# Altium footprint library Module-RaspberryPi.PcbLib: 10 footprints
Each footprint in its own frame and in the unit in brackets; x right, y up, seen from the top. Pads: shape width x height; smd on the part's side, far side on the other; paste and mask are expansions set on the pad; w line width, h text height; cw(c..) or ccw(c..) is an arc to the next point about the centre after c.
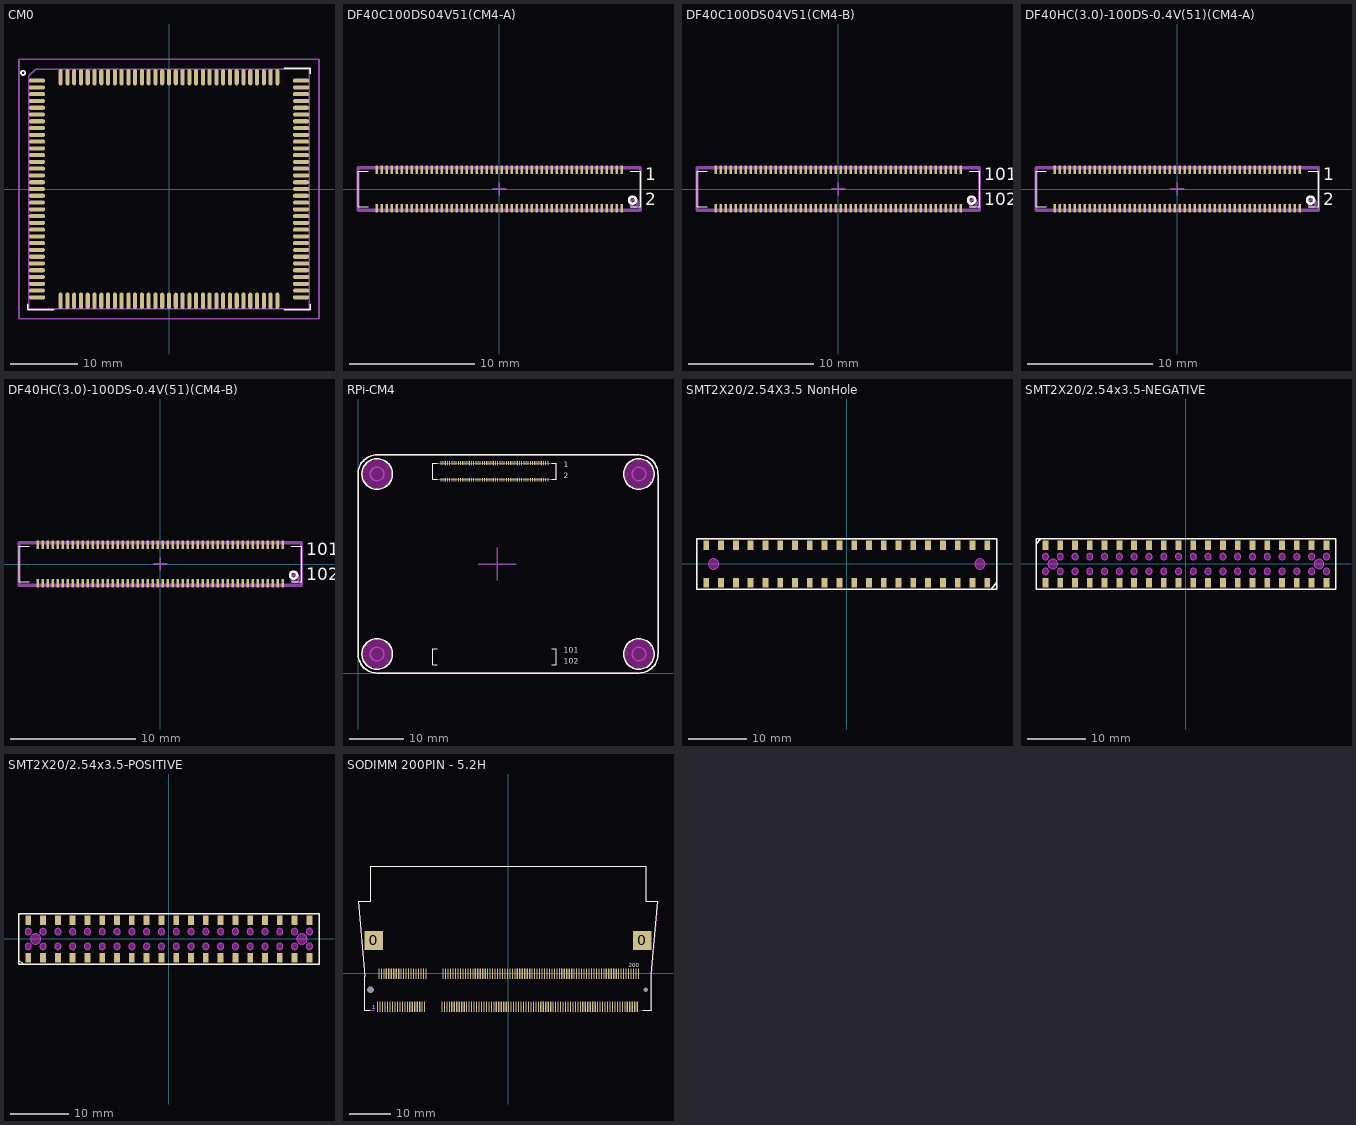
[diagram p0: the footprints below, top view; thin cyan lines are the x and y axes]

## CM0 [mm]
pads (132):
  oval 2.4x0.6 smd: 1(-19.5,16) 2(-19.5,15) 3(-19.5,14) 4(-19.5,13) 5(-19.5,12) 6(-19.5,11) 7(-19.5,10) 8(-19.5,9) 9(-19.5,8) 10(-19.5,7) 11(-19.5,6) 12(-19.5,5) 13(-19.5,4) 14(-19.5,3) 15(-19.5,2) 16(-19.5,1) 17(-19.5,0) 18(-19.5,-1) 19(-19.5,-2) 20(-19.5,-3) 21(-19.5,-4) 22(-19.5,-5) 23(-19.5,-6) 24(-19.5,-7) 25(-19.5,-8) 26(-19.5,-9) 27(-19.5,-10) 28(-19.5,-11) 29(-19.5,-12) 30(-19.5,-13) 31(-19.5,-14) 32(-19.5,-15) 33(-19.5,-16) 67(19.5,-16) 68(19.5,-15) 69(19.5,-14) 70(19.5,-13) 71(19.5,-12) 72(19.5,-11) 73(19.5,-10) 74(19.5,-9) 75(19.5,-8) 76(19.5,-7) 77(19.5,-6) 78(19.5,-5) 79(19.5,-4) 80(19.5,-3) 81(19.5,-2) 82(19.5,-1) 83(19.5,0) 84(19.5,1) 85(19.5,2) 86(19.5,3) 87(19.5,4) 88(19.5,5) 89(19.5,6) 90(19.5,7) 91(19.5,8) 92(19.5,9) 93(19.5,10) 94(19.5,11) 95(19.5,12) 96(19.5,13) 97(19.5,14) 98(19.5,15) 99(19.5,16)
  oval 0.6x2.4 smd: 34(-16,-16.5) 35(-15,-16.5) 36(-14,-16.5) 37(-13,-16.5) 38(-12,-16.5) 39(-11,-16.5) 40(-10,-16.5) 41(-9,-16.5) 42(-8,-16.5) 43(-7,-16.5) 44(-6,-16.5) 45(-5,-16.5) 46(-4,-16.5) 47(-3,-16.5) 48(-2,-16.5) 49(-1,-16.5) 50(0,-16.5) 51(1,-16.5) 52(2,-16.5) 53(3,-16.5) 54(4,-16.5) 55(5,-16.5) 56(6,-16.5) 57(7,-16.5) 58(8,-16.5) 59(9,-16.5) 60(10,-16.5) 61(11,-16.5) 62(12,-16.5) 63(13,-16.5) 64(14,-16.5) 65(15,-16.5) 66(16,-16.5) 100(16,16.5) 101(15,16.5) 102(14,16.5) 103(13,16.5) 104(12,16.5) 105(11,16.5) 106(10,16.5) 107(9,16.5) 108(8,16.5) 109(7,16.5) 110(6,16.5) 111(5,16.5) 112(4,16.5) 113(3,16.5) 114(2,16.5) 115(1,16.5) 116(0,16.5) 117(-1,16.5) 118(-2,16.5) 119(-3,16.5) 120(-4,16.5) 121(-5,16.5) 122(-6,16.5) 123(-7,16.5) 124(-8,16.5) 125(-9,16.5) 126(-10,16.5) 127(-11,16.5) 128(-12,16.5) 129(-13,16.5) 130(-14,16.5) 131(-15,16.5) 132(-16,16.5)
Top Overlay:
  circle w0.254: c-21.55,17.15 r0.32
  lines w0.254: -20.85,-17 -20.85,-17.85 -17,-17.85 ; 17,-17.85 20.85,-17.85 20.85,-17 ; 17,17.85 20.85,17.85 20.85,17
Top Component Outline:
  lines w0.254: -22.15,-19.15 22.15,-19.15 22.15,19.15 -22.15,19.15 -22.15,-19.15
Top Value:
  text "'.Comment'" at -5.908,-0.582 h2.54
Top Designator:
  text "'.Designator'" at -7.211,-0.458 h2.54
Top Assembly (Mech20):
  lines w0.254: -20.7,-17.7 -20.7,16.7 -19.7,17.7 20.7,17.7 20.7,-17.7 -20.7,-17.7
3D body "CM0.step": height 2.63, standoff 0.04, extent -19.5,-16.5 19.5,16.5

## DF40C100DS04V51(CM4-A) [mm] "DF40C100DS04V51"
pads (100):
  rect 0.2x0.7 smd: 1(9.8,1.54) 2(9.8,-1.54) 3(9.4,1.54) 4(9.4,-1.54) 5(9,1.54) 6(9,-1.54) 7(8.6,1.54) 8(8.6,-1.54) 9(8.2,1.54) 10(8.2,-1.54) 11(7.8,1.54) 12(7.8,-1.54) 13(7.4,1.54) 14(7.4,-1.54) 15(7,1.54) 16(7,-1.54) 17(6.6,1.54) 18(6.6,-1.54) 19(6.2,1.54) 20(6.2,-1.54) 21(5.8,1.54) 22(5.8,-1.54) 23(5.4,1.54) 24(5.4,-1.54) 25(5,1.54) 26(5,-1.54) 27(4.6,1.54) 28(4.6,-1.54) 29(4.2,1.54) 30(4.2,-1.54) 31(3.8,1.54) 32(3.8,-1.54) 33(3.4,1.54) 34(3.4,-1.54) 35(3,1.54) 36(3,-1.54) 37(2.6,1.54) 38(2.6,-1.54) 39(2.2,1.54) 40(2.2,-1.54) 41(1.8,1.54) 42(1.8,-1.54) 43(1.4,1.54) 44(1.4,-1.54) 45(1,1.54) 46(1,-1.54) 47(0.6,1.54) 48(0.6,-1.54) 49(0.2,1.54) 50(0.2,-1.54) 51(-0.2,1.54) 52(-0.2,-1.54) 53(-0.6,1.54) 54(-0.6,-1.54) 55(-1,1.54) 56(-1,-1.54) 57(-1.4,1.54) 58(-1.4,-1.54) 59(-1.8,1.54) 60(-1.8,-1.54) 61(-2.2,1.54) 62(-2.2,-1.54) 63(-2.6,1.54) 64(-2.6,-1.54) 65(-3,1.54) 66(-3,-1.54) 67(-3.4,1.54) 68(-3.4,-1.54) 69(-3.8,1.54) 70(-3.8,-1.54) 71(-4.2,1.54) 72(-4.2,-1.54) 73(-4.6,1.54) 74(-4.6,-1.54) 75(-5,1.54) 76(-5,-1.54) 77(-5.4,1.54) 78(-5.4,-1.54) 79(-5.8,1.54) 80(-5.8,-1.54) 81(-6.2,1.54) 82(-6.2,-1.54) 83(-6.6,1.54) 84(-6.6,-1.54) 85(-7,1.54) 86(-7,-1.54) 87(-7.4,1.54) 88(-7.4,-1.54) 89(-7.8,1.54) 90(-7.8,-1.54) 91(-8.2,1.54) 92(-8.2,-1.54) 93(-8.6,1.54) 94(-8.6,-1.54) 95(-9,1.54) 96(-9,-1.54) 97(-9.4,1.54) 98(-9.4,-1.54) 99(-9.8,1.54) 100(-9.8,-1.54)
Top Overlay:
  circle w0.2: c10.668,-0.889 r0.284
  lines w0.1: -10.5,-1.44 -11.3,-1.44 -11.3,1.44 -10.5,1.44 ; 10.5,-1.44 11.3,-1.44 11.3,1.44 10.5,1.44
  text "2" at 11.7,-1.3 h1
  text "1" at 11.7,0.7 h1
Top Component Outline:
  lines w0.254: -11.3,-1.7 -11.3,1.7 11.3,1.7 11.3,-1.7 -11.3,-1.7
Top Component Center:
  lines w0.15: -0.5,0 0.5,0 ; 0,-0.5 0,0.5
Top Value:
  text "'.Comment'" at -5.908,-0.582 h2.54
Top Designator:
  text "'.Designator'" at -7.211,-0.458 h2.54
Top Assembly (Mech20):
  circle w0.2: c10.795,-1.143 r0.284
  lines w0.2: -11.297,-1.7 -11.297,1.708 11.303,1.708 11.303,-1.7 -11.297,-1.7
3D body "DF40C-100DS.stp": height 1.4, standoff -0.05, extent -11.285,-1.69 11.315,1.69

## DF40C100DS04V51(CM4-B) [mm] "DF40C100DS04V51"
pads (100):
  rect 0.2x0.7 smd: 101(9.8,1.54) 102(9.8,-1.54) 103(9.4,1.54) 104(9.4,-1.54) 105(9,1.54) 106(9,-1.54) 107(8.6,1.54) 108(8.6,-1.54) 109(8.2,1.54) 110(8.2,-1.54) 111(7.8,1.54) 112(7.8,-1.54) 113(7.4,1.54) 114(7.4,-1.54) 115(7,1.54) 116(7,-1.54) 117(6.6,1.54) 118(6.6,-1.54) 119(6.2,1.54) 120(6.2,-1.54) 121(5.8,1.54) 122(5.8,-1.54) 123(5.4,1.54) 124(5.4,-1.54) 125(5,1.54) 126(5,-1.54) 127(4.6,1.54) 128(4.6,-1.54) 129(4.2,1.54) 130(4.2,-1.54) 131(3.8,1.54) 132(3.8,-1.54) 133(3.4,1.54) 134(3.4,-1.54) 135(3,1.54) 136(3,-1.54) 137(2.6,1.54) 138(2.6,-1.54) 139(2.2,1.54) 140(2.2,-1.54) 141(1.8,1.54) 142(1.8,-1.54) 143(1.4,1.54) 144(1.4,-1.54) 145(1,1.54) 146(1,-1.54) 147(0.6,1.54) 148(0.6,-1.54) 149(0.2,1.54) 150(0.2,-1.54) 151(-0.2,1.54) 152(-0.2,-1.54) 153(-0.6,1.54) 154(-0.6,-1.54) 155(-1,1.54) 156(-1,-1.54) 157(-1.4,1.54) 158(-1.4,-1.54) 159(-1.8,1.54) 160(-1.8,-1.54) 161(-2.2,1.54) 162(-2.2,-1.54) 163(-2.6,1.54) 164(-2.6,-1.54) 165(-3,1.54) 166(-3,-1.54) 167(-3.4,1.54) 168(-3.4,-1.54) 169(-3.8,1.54) 170(-3.8,-1.54) 171(-4.2,1.54) 172(-4.2,-1.54) 173(-4.6,1.54) 174(-4.6,-1.54) 175(-5,1.54) 176(-5,-1.54) 177(-5.4,1.54) 178(-5.4,-1.54) 179(-5.8,1.54) 180(-5.8,-1.54) 181(-6.2,1.54) 182(-6.2,-1.54) 183(-6.6,1.54) 184(-6.6,-1.54) 185(-7,1.54) 186(-7,-1.54) 187(-7.4,1.54) 188(-7.4,-1.54) 189(-7.8,1.54) 190(-7.8,-1.54) 191(-8.2,1.54) 192(-8.2,-1.54) 193(-8.6,1.54) 194(-8.6,-1.54) 195(-9,1.54) 196(-9,-1.54) 197(-9.4,1.54) 198(-9.4,-1.54) 199(-9.8,1.54) 200(-9.8,-1.54)
Top Overlay:
  circle w0.2: c10.668,-0.889 r0.284
  lines w0.1: -10.5,-1.44 -11.3,-1.44 -11.3,1.44 -10.5,1.44 ; 10.5,-1.44 11.3,-1.44 11.3,1.44 10.5,1.44
  text "102" at 11.7,-1.3 h1
  text "101" at 11.7,0.7 h1
Top Component Outline:
  lines w0.254: -11.3,-1.7 11.3,-1.7 11.3,1.7 -11.3,1.7 -11.3,-1.7
Top Component Center:
  lines w0.15: -0.5,0 0.5,0 ; 0,-0.5 0,0.5
Top Value:
  text "'.Comment'" at -5.908,-0.582 h2.54
Top Designator:
  text "'.Designator'" at -7.211,-0.458 h2.54
Top Assembly (Mech20):
  circle w0.2: c10.795,-1.143 r0.284
  lines w0.2: -11.297,-1.7 -11.297,1.708 11.303,1.708 11.303,-1.7 -11.297,-1.7
3D body "DF40C-100DS.stp": height 1.4, standoff -0.05, extent -11.3,-1.7 11.3,1.68

## DF40HC(3.0)-100DS-0.4V(51)(CM4-A) [mm] "DF40C100DS04V51"
pads (100):
  rect 0.2x0.7 smd: 1(9.8,1.54) 2(9.8,-1.54) 3(9.4,1.54) 4(9.4,-1.54) 5(9,1.54) 6(9,-1.54) 7(8.6,1.54) 8(8.6,-1.54) 9(8.2,1.54) 10(8.2,-1.54) 11(7.8,1.54) 12(7.8,-1.54) 13(7.4,1.54) 14(7.4,-1.54) 15(7,1.54) 16(7,-1.54) 17(6.6,1.54) 18(6.6,-1.54) 19(6.2,1.54) 20(6.2,-1.54) 21(5.8,1.54) 22(5.8,-1.54) 23(5.4,1.54) 24(5.4,-1.54) 25(5,1.54) 26(5,-1.54) 27(4.6,1.54) 28(4.6,-1.54) 29(4.2,1.54) 30(4.2,-1.54) 31(3.8,1.54) 32(3.8,-1.54) 33(3.4,1.54) 34(3.4,-1.54) 35(3,1.54) 36(3,-1.54) 37(2.6,1.54) 38(2.6,-1.54) 39(2.2,1.54) 40(2.2,-1.54) 41(1.8,1.54) 42(1.8,-1.54) 43(1.4,1.54) 44(1.4,-1.54) 45(1,1.54) 46(1,-1.54) 47(0.6,1.54) 48(0.6,-1.54) 49(0.2,1.54) 50(0.2,-1.54) 51(-0.2,1.54) 52(-0.2,-1.54) 53(-0.6,1.54) 54(-0.6,-1.54) 55(-1,1.54) 56(-1,-1.54) 57(-1.4,1.54) 58(-1.4,-1.54) 59(-1.8,1.54) 60(-1.8,-1.54) 61(-2.2,1.54) 62(-2.2,-1.54) 63(-2.6,1.54) 64(-2.6,-1.54) 65(-3,1.54) 66(-3,-1.54) 67(-3.4,1.54) 68(-3.4,-1.54) 69(-3.8,1.54) 70(-3.8,-1.54) 71(-4.2,1.54) 72(-4.2,-1.54) 73(-4.6,1.54) 74(-4.6,-1.54) 75(-5,1.54) 76(-5,-1.54) 77(-5.4,1.54) 78(-5.4,-1.54) 79(-5.8,1.54) 80(-5.8,-1.54) 81(-6.2,1.54) 82(-6.2,-1.54) 83(-6.6,1.54) 84(-6.6,-1.54) 85(-7,1.54) 86(-7,-1.54) 87(-7.4,1.54) 88(-7.4,-1.54) 89(-7.8,1.54) 90(-7.8,-1.54) 91(-8.2,1.54) 92(-8.2,-1.54) 93(-8.6,1.54) 94(-8.6,-1.54) 95(-9,1.54) 96(-9,-1.54) 97(-9.4,1.54) 98(-9.4,-1.54) 99(-9.8,1.54) 100(-9.8,-1.54)
Top Overlay:
  circle w0.2: c10.668,-0.889 r0.284
  lines w0.1: -10.5,-1.44 -11.3,-1.44 -11.3,1.44 -10.5,1.44 ; 10.5,-1.44 11.3,-1.44 11.3,1.44 10.5,1.44
  text "2" at 11.7,-1.3 h1
  text "1" at 11.7,0.7 h1
Top Component Outline:
  lines w0.254: -11.3,-1.7 -11.3,1.7 11.3,1.7 11.3,-1.7 -11.3,-1.7
Top Component Center:
  lines w0.15: -0.5,0 0.5,0 ; 0,-0.5 0,0.5
Top Value:
  text "'.Comment'" at -5.908,-0.582 h2.54
Top Designator:
  text "'.Designator'" at -7.211,-0.458 h2.54
Top Assembly (Mech20):
  circle w0.2: c10.795,-1.143 r0.284
  lines w0.2: -11.297,-1.7 -11.297,1.708 11.303,1.708 11.303,-1.7 -11.297,-1.7
3D body "DF40HC_3.0_-100DS-0.4V_51.stp": height 2.91, standoff 0.01, extent -11.3,-1.69 11.3,1.69

## DF40HC(3.0)-100DS-0.4V(51)(CM4-B) [mm] "DF40C100DS04V51"
pads (100):
  rect 0.2x0.7 smd: 101(9.8,1.54) 102(9.8,-1.54) 103(9.4,1.54) 104(9.4,-1.54) 105(9,1.54) 106(9,-1.54) 107(8.6,1.54) 108(8.6,-1.54) 109(8.2,1.54) 110(8.2,-1.54) 111(7.8,1.54) 112(7.8,-1.54) 113(7.4,1.54) 114(7.4,-1.54) 115(7,1.54) 116(7,-1.54) 117(6.6,1.54) 118(6.6,-1.54) 119(6.2,1.54) 120(6.2,-1.54) 121(5.8,1.54) 122(5.8,-1.54) 123(5.4,1.54) 124(5.4,-1.54) 125(5,1.54) 126(5,-1.54) 127(4.6,1.54) 128(4.6,-1.54) 129(4.2,1.54) 130(4.2,-1.54) 131(3.8,1.54) 132(3.8,-1.54) 133(3.4,1.54) 134(3.4,-1.54) 135(3,1.54) 136(3,-1.54) 137(2.6,1.54) 138(2.6,-1.54) 139(2.2,1.54) 140(2.2,-1.54) 141(1.8,1.54) 142(1.8,-1.54) 143(1.4,1.54) 144(1.4,-1.54) 145(1,1.54) 146(1,-1.54) 147(0.6,1.54) 148(0.6,-1.54) 149(0.2,1.54) 150(0.2,-1.54) 151(-0.2,1.54) 152(-0.2,-1.54) 153(-0.6,1.54) 154(-0.6,-1.54) 155(-1,1.54) 156(-1,-1.54) 157(-1.4,1.54) 158(-1.4,-1.54) 159(-1.8,1.54) 160(-1.8,-1.54) 161(-2.2,1.54) 162(-2.2,-1.54) 163(-2.6,1.54) 164(-2.6,-1.54) 165(-3,1.54) 166(-3,-1.54) 167(-3.4,1.54) 168(-3.4,-1.54) 169(-3.8,1.54) 170(-3.8,-1.54) 171(-4.2,1.54) 172(-4.2,-1.54) 173(-4.6,1.54) 174(-4.6,-1.54) 175(-5,1.54) 176(-5,-1.54) 177(-5.4,1.54) 178(-5.4,-1.54) 179(-5.8,1.54) 180(-5.8,-1.54) 181(-6.2,1.54) 182(-6.2,-1.54) 183(-6.6,1.54) 184(-6.6,-1.54) 185(-7,1.54) 186(-7,-1.54) 187(-7.4,1.54) 188(-7.4,-1.54) 189(-7.8,1.54) 190(-7.8,-1.54) 191(-8.2,1.54) 192(-8.2,-1.54) 193(-8.6,1.54) 194(-8.6,-1.54) 195(-9,1.54) 196(-9,-1.54) 197(-9.4,1.54) 198(-9.4,-1.54) 199(-9.8,1.54) 200(-9.8,-1.54)
Top Overlay:
  circle w0.2: c10.668,-0.889 r0.284
  lines w0.1: -10.5,-1.44 -11.3,-1.44 -11.3,1.44 -10.5,1.44 ; 10.5,-1.44 11.3,-1.44 11.3,1.44 10.5,1.44
  text "102" at 11.7,-1.3 h1
  text "101" at 11.7,0.7 h1
Top Component Outline:
  lines w0.254: -11.3,-1.7 11.3,-1.7 11.3,1.7 -11.3,1.7 -11.3,-1.7
Top Component Center:
  lines w0.15: -0.5,0 0.5,0 ; 0,-0.5 0,0.5
Top Value:
  text "'.Comment'" at -5.908,-0.582 h2.54
Top Designator:
  text "'.Designator'" at -7.211,-0.458 h2.54
Top Assembly (Mech20):
  circle w0.2: c10.795,-1.143 r0.284
  lines w0.2: -11.297,-1.7 -11.297,1.708 11.303,1.708 11.303,-1.7 -11.297,-1.7
3D body "DF40HC_3.0_-100DS-0.4V_51.stp": height 2.91, standoff 0.01, extent -11.3,-1.69 11.3,1.69

## RPi-CM4 [mm] "The Raspberry Pi Compute Module 4 (CM4) is a System on Module (SoM) containing processor, memory, eMMC Flash  and supporting power circuitry."
pads (100):
  rect 0.2x0.7 smd: 1(15.2,35.46) 2(15.2,38.54) 3(15.6,35.46) 4(15.6,38.54) 5(16,35.46) 6(16,38.54) 7(16.4,35.46) 8(16.4,38.54) 9(16.8,35.46) 10(16.8,38.54) 11(17.2,35.46) 12(17.2,38.54) 13(17.6,35.46) 14(17.6,38.54) 15(18,35.46) 16(18,38.54) 17(18.4,35.46) 18(18.4,38.54) 19(18.8,35.46) 20(18.8,38.54) 21(19.2,35.46) 22(19.2,38.54) 23(19.6,35.46) 24(19.6,38.54) 25(20,35.46) 26(20,38.54) 27(20.4,35.46) 28(20.4,38.54) 29(20.8,35.46) 30(20.8,38.54) 31(21.2,35.46) 32(21.2,38.54) 33(21.6,35.46) 34(21.6,38.54) 35(22,35.46) 36(22,38.54) 37(22.4,35.46) 38(22.4,38.54) 39(22.8,35.46) 40(22.8,38.54) 41(23.2,35.46) 42(23.2,38.54) 43(23.6,35.46) 44(23.6,38.54) 45(24,35.46) 46(24,38.54) 47(24.4,35.46) 48(24.4,38.54) 49(24.8,35.46) 50(24.8,38.54) 51(25.2,35.46) 52(25.2,38.54) 53(25.6,35.46) 54(25.6,38.54) 55(26,35.46) 56(26,38.54) 57(26.4,35.46) 58(26.4,38.54) 59(26.8,35.46) 60(26.8,38.54) 61(27.2,35.46) 62(27.2,38.54) 63(27.6,35.46) 64(27.6,38.54) 65(28,35.46) 66(28,38.54) 67(28.4,35.46) 68(28.4,38.54) 69(28.8,35.46) 70(28.8,38.54) 71(29.2,35.46) 72(29.2,38.54) 73(29.6,35.46) 74(29.6,38.54) 75(30,35.46) 76(30,38.54) 77(30.4,35.46) 78(30.4,38.54) 79(30.8,35.46) 80(30.8,38.54) 81(31.2,35.46) 82(31.2,38.54) 83(31.6,35.46) 84(31.6,38.54) 85(32,35.46) 86(32,38.54) 87(32.4,35.46) 88(32.4,38.54) 89(32.8,35.46) 90(32.8,38.54) 91(33.2,35.46) 92(33.2,38.54) 93(33.6,35.46) 94(33.6,38.54) 95(34,35.46) 96(34,38.54) 97(34.4,35.46) 98(34.4,38.54) 99(34.8,35.46) 100(34.8,38.54)
Top Overlay:
  circle w0.254: c3.5,3.5 r2.8
  circle w0.254: c3.5,36.5 r2.8
  circle w0.254: c51.5,36.5 r2.8
  circle w0.254: c51.5,3.5 r2.8
  lines w0.1: 14.5,1.56 13.7,1.56 13.7,4.44 14.5,4.44 ; 14.5,35.56 13.7,35.56 13.7,38.44 14.5,38.44 ; 35.5,1.56 36.3,1.56 36.3,4.44 35.5,4.44 ; 35.5,35.56 36.3,35.56 36.3,38.44 35.5,38.44
  lines w0.254: 0,3.5 0,36.5 ; 0,36.515 cw(c3.493,36.507) 3.502,40 ; 0.007,3.509 ccw(c3.5,3.5) 3.491,0.007 ; 3.5,0 51.5,0 ; 3.5,40 51.5,40 ; 51.491,0.007 ccw(c51.5,3.5) 54.993,3.491 ; 51.509,39.993 cw(c51.5,36.5) 54.993,36.491 ; 55,3.5 55,36.5
  text "1" at 37.7,37.7 h1
  text "2" at 37.7,35.7 h1
  text "101" at 37.7,3.7 h1
  text "102" at 37.7,1.7 h1
Keep-Out Layer:
  board cut-out: 2.25,3.5 2.25,3.377 2.298,3.135 2.392,2.908 2.529,2.703 2.703,2.529 2.908,2.392 3.135,2.298 3.377,2.25 3.5,2.25 3.623,2.25 3.865,2.298 4.092,2.392 4.297,2.529 4.471,2.703 4.608,2.908 4.702,3.135 4.75,3.377 4.75,3.5 4.75,3.623 4.702,3.865 4.608,4.092 4.471,4.297 4.297,4.471 4.092,4.608 3.865,4.702 3.623,4.75 3.5,4.75 3.377,4.75 3.135,4.702 2.908,4.608 2.703,4.471 2.529,4.297 2.392,4.092 2.298,3.865 2.25,3.623
  board cut-out: 3.5,35.25 3.377,35.25 3.135,35.298 2.908,35.392 2.703,35.529 2.529,35.703 2.392,35.908 2.298,36.135 2.25,36.377 2.25,36.5 2.25,36.623 2.298,36.865 2.392,37.092 2.529,37.297 2.703,37.471 2.908,37.608 3.135,37.702 3.377,37.75 3.5,37.75 3.623,37.75 3.865,37.702 4.092,37.608 4.297,37.471 4.471,37.297 4.608,37.092 4.702,36.865 4.75,36.623 4.75,36.5 4.75,36.377 4.702,36.135 4.608,35.908 4.471,35.703 4.297,35.529 4.092,35.392 3.865,35.298 3.623,35.25
  board cut-out: 50.25,36.5 50.25,36.377 50.298,36.135 50.392,35.908 50.529,35.703 50.703,35.529 50.908,35.392 51.135,35.298 51.377,35.25 51.5,35.25 51.623,35.25 51.865,35.298 52.092,35.392 52.297,35.529 52.471,35.703 52.608,35.908 52.702,36.135 52.75,36.377 52.75,36.5 52.75,36.623 52.702,36.865 52.608,37.092 52.471,37.297 52.297,37.471 52.092,37.608 51.865,37.702 51.623,37.75 51.5,37.75 51.377,37.75 51.135,37.702 50.908,37.608 50.703,37.471 50.529,37.297 50.392,37.092 50.298,36.865 50.25,36.623
  board cut-out: 50.25,3.5 50.25,3.377 50.298,3.135 50.392,2.908 50.529,2.703 50.703,2.529 50.908,2.392 51.135,2.298 51.377,2.25 51.5,2.25 51.623,2.25 51.865,2.298 52.092,2.392 52.297,2.529 52.471,2.703 52.608,2.908 52.702,3.135 52.75,3.377 52.75,3.5 52.75,3.623 52.702,3.865 52.608,4.092 52.471,4.297 52.297,4.471 52.092,4.608 51.865,4.702 51.623,4.75 51.5,4.75 51.377,4.75 51.135,4.702 50.908,4.608 50.703,4.471 50.529,4.297 50.392,4.092 50.298,3.865 50.25,3.623
Keep-Out Layer:
  circle w2.5: c3.5,3.5 r1.5
  circle w2.5: c51.5,3.5 r1.5
  circle w2.5: c51.5,36.5 r1.5
  circle w2.5: c3.5,36.5 r1.5
Board Outline:
  circle w0.254: c3.5,3.5 r1.25
  circle w0.254: c3.5,36.5 r1.25
  circle w0.254: c51.5,36.5 r1.25
  circle w0.254: c51.5,3.5 r1.25
Top Component Outline:
  lines w0.254: 0,3.5 0,36.5 ; 0,36.515 cw(c3.493,36.507) 3.502,40 ; 0.007,3.509 ccw(c3.5,3.5) 3.491,0.007 ; 3.5,0 51.5,0 ; 3.5,40 51.5,40 ; 51.491,0.007 ccw(c51.5,3.5) 54.993,3.491 ; 51.509,39.993 cw(c51.5,36.5) 54.993,36.491 ; 55,3.5 55,36.5
Top Component Center:
  lines w0.254: 22,20 25.5,20 29,20 ; 25.5,17 25.5,23
Top Value:
  text "'.Comment'" at 20,20.019 h2.54
Top Designator:
  text "'.Designator'" at 19,18.444 h2.54
Body Extra:
  lines w0.2: 13.7,35.56 13.7,38.44 36.3,38.44 36.3,35.56 13.7,35.56
3D body "DF40C-100DS.stp": height 1.4, standoff -0.05, extent 13.685,35.31 36.285,38.69
3D body "CM4.step": height 5.65, standoff 0.87, extent 0,0 55,40

## SMT2X20/2.54X3.5 NonHole [mm]
pads (40):
  rect 1x1.6 smd: 1(24.13,-3.2) 2(24.13,3.2) 3(21.59,-3.2) 4(21.59,3.2) 5(19.05,-3.2) 6(19.05,3.2) 7(16.51,-3.2) 8(16.51,3.2) 9(13.97,-3.2) 10(13.97,3.2) 11(11.43,-3.2) 12(11.43,3.2) 13(8.89,-3.2) 14(8.89,3.2) 15(6.35,-3.2) 16(6.35,3.2) 17(3.81,-3.2) 18(3.81,3.2) 19(1.27,-3.2) 20(1.27,3.2) 21(-1.27,-3.2) 22(-1.27,3.2) 23(-3.81,-3.2) 24(-3.81,3.2) 25(-6.35,-3.2) 26(-6.35,3.2) 27(-8.89,-3.2) 28(-8.89,3.2) 29(-11.43,-3.2) 30(-11.43,3.2) 31(-13.97,-3.2) 32(-13.97,3.2) 33(-16.51,-3.2) 34(-16.51,3.2) 35(-19.05,-3.2) 36(-19.05,3.2) 37(-21.59,-3.2) 38(-21.59,3.2) 39(-24.13,-3.2) 40(-24.13,3.2)
Top Overlay:
  lines w0.254: 24.847,-4.318 25.781,-3.118 ; -25.72,-4.318 25.781,-4.318 25.781,4.317 -25.72,4.317 -25.72,-4.318
Keep-Out Layer:
  board cut-out: 21.96,0 21.96,-0.089 21.995,-0.263 22.062,-0.426 22.161,-0.574 22.286,-0.699 22.434,-0.798 22.597,-0.865 22.771,-0.9 22.86,-0.9 22.949,-0.9 23.123,-0.865 23.286,-0.798 23.434,-0.699 23.559,-0.574 23.658,-0.426 23.725,-0.263 23.76,-0.089 23.76,0 23.76,0.089 23.725,0.263 23.658,0.426 23.559,0.574 23.434,0.699 23.286,0.798 23.123,0.865 22.949,0.9 22.86,0.9 22.771,0.9 22.597,0.865 22.434,0.798 22.286,0.699 22.161,0.574 22.062,0.426 21.995,0.263 21.96,0.089
  board cut-out: -22.86,-0.9 -22.949,-0.9 -23.123,-0.865 -23.286,-0.798 -23.434,-0.699 -23.559,-0.574 -23.658,-0.426 -23.725,-0.263 -23.76,-0.089 -23.76,0 -23.76,0.089 -23.725,0.263 -23.658,0.426 -23.559,0.574 -23.434,0.699 -23.286,0.798 -23.123,0.865 -22.949,0.9 -22.86,0.9 -22.771,0.9 -22.597,0.865 -22.434,0.798 -22.286,0.699 -22.161,0.574 -22.062,0.426 -21.995,0.263 -21.96,0.089 -21.96,0 -21.96,-0.089 -21.995,-0.263 -22.062,-0.426 -22.161,-0.574 -22.286,-0.699 -22.434,-0.798 -22.597,-0.865 -22.771,-0.9
Board Outline:
  circle w0.1: c-22.86,0 r0.9
  circle w0.1: c22.86,0 r0.9
Top Value:
  text "'.Comment'" at -4.505,-1.708 h2.03
Top Designator:
  text "'.Designator'" at -5.6,-0.6 h2.03
Bottom Courtyard:
  lines w0.102: -25.7,-4.3 -25.7,4.3 25.8,4.3 25.8,-4.3 -25.7,-4.3
Top Assembly (Mech20):
  lines w0.203: -25.72,-4.318 25.781,-4.318 25.781,4.317 -25.72,4.317 -25.72,-4.318
3D body "2.54-3.55.STEP": height 3.92, standoff 0, extent -25.541,-3.729 25.659,3.471

## SMT2X20/2.54x3.5-NEGATIVE [mm]
pads (40):
  rect 1x1.6 smd: 1(-24.13,3.22) 2(-24.13,-3.2) 3(-21.59,3.22) 4(-21.59,-3.2) 5(-19.05,3.22) 6(-19.05,-3.2) 7(-16.51,3.22) 8(-16.51,-3.2) 9(-13.97,3.22) 10(-13.97,-3.2) 11(-11.43,3.22) 12(-11.43,-3.2) 13(-8.89,3.22) 14(-8.89,-3.2) 15(-6.35,3.22) 16(-6.35,-3.2) 17(-3.81,3.22) 18(-3.81,-3.2) 19(-1.27,3.22) 20(-1.27,-3.2) 21(1.27,3.22) 22(1.27,-3.2) 23(3.81,3.22) 24(3.81,-3.2) 25(6.35,3.22) 26(6.35,-3.2) 27(8.89,3.22) 28(8.89,-3.2) 29(11.43,3.22) 30(11.43,-3.2) 31(13.97,3.22) 32(13.97,-3.2) 33(16.51,3.22) 34(16.51,-3.2) 35(19.05,3.22) 36(19.05,-3.2) 37(21.59,3.22) 38(21.59,-3.2) 39(24.13,3.22) 40(24.13,-3.2)
Top Overlay:
  lines w0.254: -25.7,3.5 -24.9,4.3 ; 25.751,-4.318 -25.751,-4.318 -25.72,-4.318 -25.72,4.317 25.781,4.317 25.781,-4.318
Keep-Out Layer:
  drawing of 42 lines, arcs and shapes, not listed
Board Outline:
  circle w0.05: c-3.81,-1.27 r0.55
  circle w0.05: c1.27,-1.27 r0.55
  circle w0.05: c-11.43,-1.27 r0.55
  circle w0.05: c-13.97,-1.27 r0.55
  circle w0.05: c-19.05,-1.27 r0.55
  circle w0.05: c-16.51,-1.27 r0.55
  circle w0.05: c-6.35,-1.27 r0.55
  circle w0.05: c-8.89,-1.27 r0.55
  circle w0.05: c-1.27,-1.27 r0.55
  circle w0.05: c8.89,-1.27 r0.55
  circle w0.05: c6.35,-1.27 r0.55
  circle w0.05: c13.97,-1.27 r0.55
  circle w0.05: c11.43,-1.27 r0.55
  circle w0.05: c19.05,-1.27 r0.55
  circle w0.05: c21.59,-1.27 r0.55
  circle w0.05: c3.81,-1.27 r0.55
  circle w0.05: c16.51,-1.27 r0.55
  circle w0.05: c24.13,-1.27 r0.55
  circle w0.05: c22.86,0 r0.85
  circle w0.05: c-24.13,-1.27 r0.55
  circle w0.05: c-21.59,-1.27 r0.55
  circle w0.05: c-24.13,1.27 r0.55
  circle w0.05: c13.97,1.27 r0.55
  circle w0.05: c8.89,1.27 r0.55
  circle w0.05: c19.05,1.27 r0.55
  circle w0.05: c11.43,1.27 r0.55
  circle w0.05: c6.35,1.27 r0.55
  circle w0.05: c21.59,1.27 r0.55
  circle w0.05: c16.51,1.27 r0.55
  circle w0.05: c-19.05,1.27 r0.55
  circle w0.05: c-21.59,1.27 r0.55
  circle w0.05: c-6.35,1.27 r0.55
  circle w0.05: c-8.89,1.27 r0.55
  circle w0.05: c-11.43,1.27 r0.55
  circle w0.05: c-13.97,1.27 r0.55
  circle w0.05: c-3.81,1.27 r0.55
  circle w0.05: c-1.27,1.27 r0.55
  circle w0.05: c-16.51,1.27 r0.55
  circle w0.05: c3.81,1.27 r0.55
  circle w0.05: c24.13,1.27 r0.55
  circle w0.05: c1.27,1.27 r0.55
  circle w0.05: c-22.86,0 r0.85
Top Value:
  text "'.Comment'" at -4.405,-1.308 h2.03
Top Designator:
  text "'.Designator'" at -5.5,-0.2 h2.03
3D body "2.54-3.55.STEP": height 3.97, standoff 0.05, extent -25.591,-3.63 25.609,3.57

## SMT2X20/2.54x3.5-POSITIVE [mm]
pads (40):
  rect 1x1.6 smd: 1(-24.13,-3.2) 2(-24.13,3.2) 3(-21.59,-3.2) 4(-21.59,3.2) 5(-19.05,-3.2) 6(-19.05,3.2) 7(-16.51,-3.2) 8(-16.51,3.2) 9(-13.97,-3.2) 10(-13.97,3.2) 11(-11.43,-3.2) 12(-11.43,3.2) 13(-8.89,-3.2) 14(-8.89,3.2) 15(-6.35,-3.2) 16(-6.35,3.2) 17(-3.81,-3.2) 18(-3.81,3.2) 19(-1.27,-3.2) 20(-1.27,3.2) 21(1.27,-3.2) 22(1.27,3.2) 23(3.81,-3.2) 24(3.81,3.2) 25(6.35,-3.2) 26(6.35,3.2) 27(8.89,-3.2) 28(8.89,3.2) 29(11.43,-3.2) 30(11.43,3.2) 31(13.97,-3.2) 32(13.97,3.2) 33(16.51,-3.2) 34(16.51,3.2) 35(19.05,-3.2) 36(19.05,3.2) 37(21.59,-3.2) 38(21.59,3.2) 39(24.13,-3.2) 40(24.13,3.2)
Top Overlay:
  lines w0.2: -25.7,-3.7 -24.8,-4.3
  lines w0.254: -25.72,-4.318 -25.72,4.317 25.781,4.317 25.781,-4.318 -25.72,-4.318
Keep-Out Layer:
  drawing of 43 lines, arcs and shapes, not listed
Board Outline:
  circle w0.05: c-24.13,-1.27 r0.55
  circle w0.05: c-3.81,-1.27 r0.55
  circle w0.05: c1.27,-1.27 r0.55
  circle w0.05: c-11.43,-1.27 r0.55
  circle w0.05: c-21.59,-1.27 r0.55
  circle w0.05: c-13.97,-1.27 r0.55
  circle w0.05: c-19.05,-1.27 r0.55
  circle w0.05: c-16.51,-1.27 r0.55
  circle w0.05: c-6.35,-1.27 r0.55
  circle w0.05: c-8.89,-1.27 r0.55
  circle w0.05: c-1.27,-1.27 r0.55
  circle w0.05: c8.89,-1.27 r0.55
  circle w0.05: c6.35,-1.27 r0.55
  circle w0.05: c13.97,-1.27 r0.55
  circle w0.05: c11.43,-1.27 r0.55
  circle w0.05: c19.05,-1.27 r0.55
  circle w0.05: c21.59,-1.27 r0.55
  circle w0.05: c3.81,-1.27 r0.55
  circle w0.05: c16.51,-1.27 r0.55
  circle w0.05: c24.13,-1.27 r0.55
  circle w0.05: c-24.13,1.27 r0.55
  circle w0.05: c13.97,1.27 r0.55
  circle w0.05: c8.89,1.27 r0.55
  circle w0.05: c19.05,1.27 r0.55
  circle w0.05: c11.43,1.27 r0.55
  circle w0.05: c6.35,1.27 r0.55
  circle w0.05: c21.59,1.27 r0.55
  circle w0.05: c16.51,1.27 r0.55
  circle w0.05: c-19.05,1.27 r0.55
  circle w0.05: c-21.59,1.27 r0.55
  circle w0.05: c-6.35,1.27 r0.55
  circle w0.05: c-8.89,1.27 r0.55
  circle w0.05: c-11.43,1.27 r0.55
  circle w0.05: c-13.97,1.27 r0.55
  circle w0.05: c-3.81,1.27 r0.55
  circle w0.05: c-1.27,1.27 r0.55
  circle w0.05: c-16.51,1.27 r0.55
  circle w0.05: c3.81,1.27 r0.55
  circle w0.05: c24.13,1.27 r0.55
  circle w0.05: c1.27,1.27 r0.55
  circle w0.1: c22.86,0 r0.9
  circle w0.1: c-22.86,0 r0.9
Top Value:
  text "'.Comment'" at -4.405,-1.308 h2.03
Top Designator:
  text "'.Designator'" at -5.5,-0.2 h2.03
3D body "2.54-3.55.STEP": height 3.77, standoff -0.15, extent -25.541,-3.63 25.659,3.57

## SODIMM 200PIN - 5.2H [mm] "200 位 SODIMM DDR2 SDRAM 表面贴装"
height 5.2
pads (204):
  round 0.5 hole 1.6 unplated: 0(-33.4,-3.95)
  rect 4.5x4.6 smd: 0(-32.55,8.05) 0(32.55,8.05)
  round 0.5 hole 1.1 unplated: 0(33.4,-3.95)
  rect 0.279x2.55 smd: 1(-31.65,-8.05) 2(-31.35,-0.05) 3(-31.05,-8.05) 4(-30.75,-0.05) 5(-30.45,-8.05) 6(-30.15,-0.05) 7(-29.85,-8.05) 8(-29.55,-0.05) 9(-29.25,-8.05) 10(-28.95,-0.05) 11(-28.65,-8.05) 12(-28.35,-0.05) 13(-28.05,-8.05) 14(-27.75,-0.05) 15(-27.45,-8.05) 16(-27.15,-0.05) 17(-26.85,-8.05) 18(-26.55,-0.05) 19(-26.25,-8.05) 20(-25.95,-0.05) 21(-25.65,-8.05) 22(-25.35,-0.05) 23(-25.05,-8.05) 24(-24.75,-0.05) 25(-24.45,-8.05) 26(-24.15,-0.05) 27(-23.85,-8.05) 28(-23.55,-0.05) 29(-23.25,-8.05) 30(-22.95,-0.05) 31(-22.65,-8.05) 32(-22.35,-0.05) 33(-22.05,-8.05) 34(-21.75,-0.05) 35(-21.45,-8.05) 36(-21.15,-0.05) 37(-20.85,-8.05) 38(-20.55,-0.05) 39(-20.25,-8.05) 40(-19.95,-0.05) 41(-16.05,-8.05) 42(-15.75,-0.05) 43(-15.45,-8.05) 44(-15.15,-0.05) 45(-14.85,-8.05) 46(-14.55,-0.05) 47(-14.25,-8.05) 48(-13.95,-0.05) 49(-13.65,-8.05) 50(-13.35,-0.05) 51(-13.05,-8.05) 52(-12.75,-0.05) 53(-12.45,-8.05) 54(-12.15,-0.05) 55(-11.85,-8.05) 56(-11.55,-0.05) 57(-11.25,-8.05) 58(-10.95,-0.05) 59(-10.65,-8.05) 60(-10.35,-0.05) 61(-10.05,-8.05) 62(-9.75,-0.05) 63(-9.45,-8.05) 64(-9.15,-0.05) 65(-8.85,-8.05) 66(-8.55,-0.05) 67(-8.25,-8.05) 68(-7.95,-0.05) 69(-7.65,-8.05) 70(-7.35,-0.05) 71(-7.05,-8.05) 72(-6.75,-0.05) 73(-6.45,-8.05) 74(-6.15,-0.05) 75(-5.85,-8.05) 76(-5.55,-0.05) 77(-5.25,-8.05) 78(-4.95,-0.05) 79(-4.65,-8.05) 80(-4.35,-0.05) 81(-4.05,-8.05) 82(-3.75,-0.05) 83(-3.45,-8.05) 84(-3.15,-0.05) 85(-2.85,-8.05) 86(-2.55,-0.05) 87(-2.25,-8.05) 88(-1.95,-0.05) 89(-1.65,-8.05) 90(-1.35,-0.05) 91(-1.05,-8.05) 92(-0.75,-0.05) 93(-0.45,-8.05) 94(-0.15,-0.05) 95(0.15,-8.05) 96(0.45,-0.05) 97(0.75,-8.05) 98(1.05,-0.05) 99(1.35,-8.05) 100(1.65,-0.05) 101(1.95,-8.05) 102(2.25,-0.05) 103(2.55,-8.05) 104(2.85,-0.05) 105(3.15,-8.05) 106(3.45,-0.05) 107(3.75,-8.05) 108(4.05,-0.05) 109(4.35,-8.05) 110(4.65,-0.05) 111(4.95,-8.05) 112(5.25,-0.05) 113(5.55,-8.05) 114(5.85,-0.05) 115(6.15,-8.05) 116(6.45,-0.05) 117(6.75,-8.05) 118(7.05,-0.05) 119(7.35,-8.05) 120(7.65,-0.05) 121(7.95,-8.05) 122(8.25,-0.05) 123(8.55,-8.05) 124(8.85,-0.05) 125(9.15,-8.05) 126(9.45,-0.05) 127(9.75,-8.05) 128(10.05,-0.05) 129(10.35,-8.05) 130(10.65,-0.05) 131(10.95,-8.05) 132(11.25,-0.05) 133(11.55,-8.05) 134(11.85,-0.05) 135(12.15,-8.05) 136(12.45,-0.05) 137(12.75,-8.05) 138(13.05,-0.05) 139(13.35,-8.05) 140(13.65,-0.05) 141(13.95,-8.05) 142(14.25,-0.05) 143(14.55,-8.05) 144(14.85,-0.05) 145(15.15,-8.05) 146(15.45,-0.05) 147(15.75,-8.05) 148(16.05,-0.05) 149(16.35,-8.05) 150(16.65,-0.05) 151(16.95,-8.05) 152(17.25,-0.05) 153(17.55,-8.05) 154(17.85,-0.05) 155(18.15,-8.05) 156(18.45,-0.05) 157(18.75,-8.05) 158(19.05,-0.05) 159(19.35,-8.05) 160(19.65,-0.05) 161(19.95,-8.05) 162(20.25,-0.05) 163(20.55,-8.05) 164(20.85,-0.05) 165(21.15,-8.05) 166(21.45,-0.05) 167(21.75,-8.05) 168(22.05,-0.05) 169(22.35,-8.05) 170(22.65,-0.05) 171(22.95,-8.05) 172(23.25,-0.05) 173(23.55,-8.05) 174(23.85,-0.05) 175(24.15,-8.05) 176(24.45,-0.05) 177(24.75,-8.05) 178(25.05,-0.05) 179(25.35,-8.05) 180(25.65,-0.05) 181(25.95,-8.05) 182(26.25,-0.05) 183(26.55,-8.05) 184(26.85,-0.05) 185(27.15,-8.05) 186(27.45,-0.05) 187(27.75,-8.05) 188(28.05,-0.05) 189(28.35,-8.05) 190(28.65,-0.05) 191(28.95,-8.05) 192(29.25,-0.05) 193(29.55,-8.05) 194(29.85,-0.05) 195(30.15,-8.05) 196(30.45,-0.05) 197(30.75,-8.05) 198(31.05,-0.05) 199(31.35,-8.05) 200(31.65,-0.05)
Top Overlay:
  lines w0.254: -33.625,-8.95 -34.8,-8.95 -34.8,-0.679 -36.396,17.55 -33.302,17.55 -33.302,26.05 33.574,26.05 33.574,17.55 36.35,17.55 34.8,-0.15 34.8,-8.95 32.7,-8.95
  text "1" at -32.925,-8.675 h1
  text "200" at 29.31,1.551 h1
Top Component Outline:
  lines w0.1: -32.325,-8.95 -34.825,-8.95 -34.825,-0.725 -36.425,17.575 -33.35,17.575 -33.35,26.05 33.6,26.05 33.6,17.575 36.4,17.575 34.825,-0.025 34.825,-8.975 31.825,-9.025
Top Value:
  text "'.Comment'" at -5.508,-4.761 h2.54
Top Designator:
  text "'.Designator'" at -8.756,-5.19 h3.05
3D body "DDR2座子.stp": height 5.26, standoff -0.92, extent -35.75,-8.755 35.75,17.8